# Altium schematic symbol library KF126-4P.SchLib: 1 symbol
Pins are listed as number, name and electrical type; pins without a type are passive.

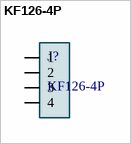
[diagram p0: symbol KF126-4P]

## KF126-4P
designator J?
4 Position Wire to Board Terminal Block Horizontal with Board 0.197 (5.00mm) Through Hole; MP: 282836-4; MF: TE Connectivity; Package: None; Availability: In Stock; Value: KF126-4P; Purchase-URL: https://pricing.snapeda.com/search/part/282836-4/?ref=eda; Check_prices: https://www.snapeda.com/parts/282836-4/TE+Connectivity+AMP+Connectors/view-part/?ref=eda; Price: None; SnapEDA_Link: https://www.snapeda.com/parts/282836-4/TE+Connectivity+AMP+Connectors/view-part/?ref=snap
footprint KF126-4P
pins: 1, 2, 3, 4